# Altium footprint library DIM.PcbLib: 183 footprints (part 7 of 12)
Each footprint in its own frame and in the unit in brackets; x right, y up, seen from the top. Pads: shape width x height; smd on the part's side, far side on the other; paste and mask are expansions set on the pad; w line width, h text height; cw(c..) or ccw(c..) is an arc to the next point about the centre after c.
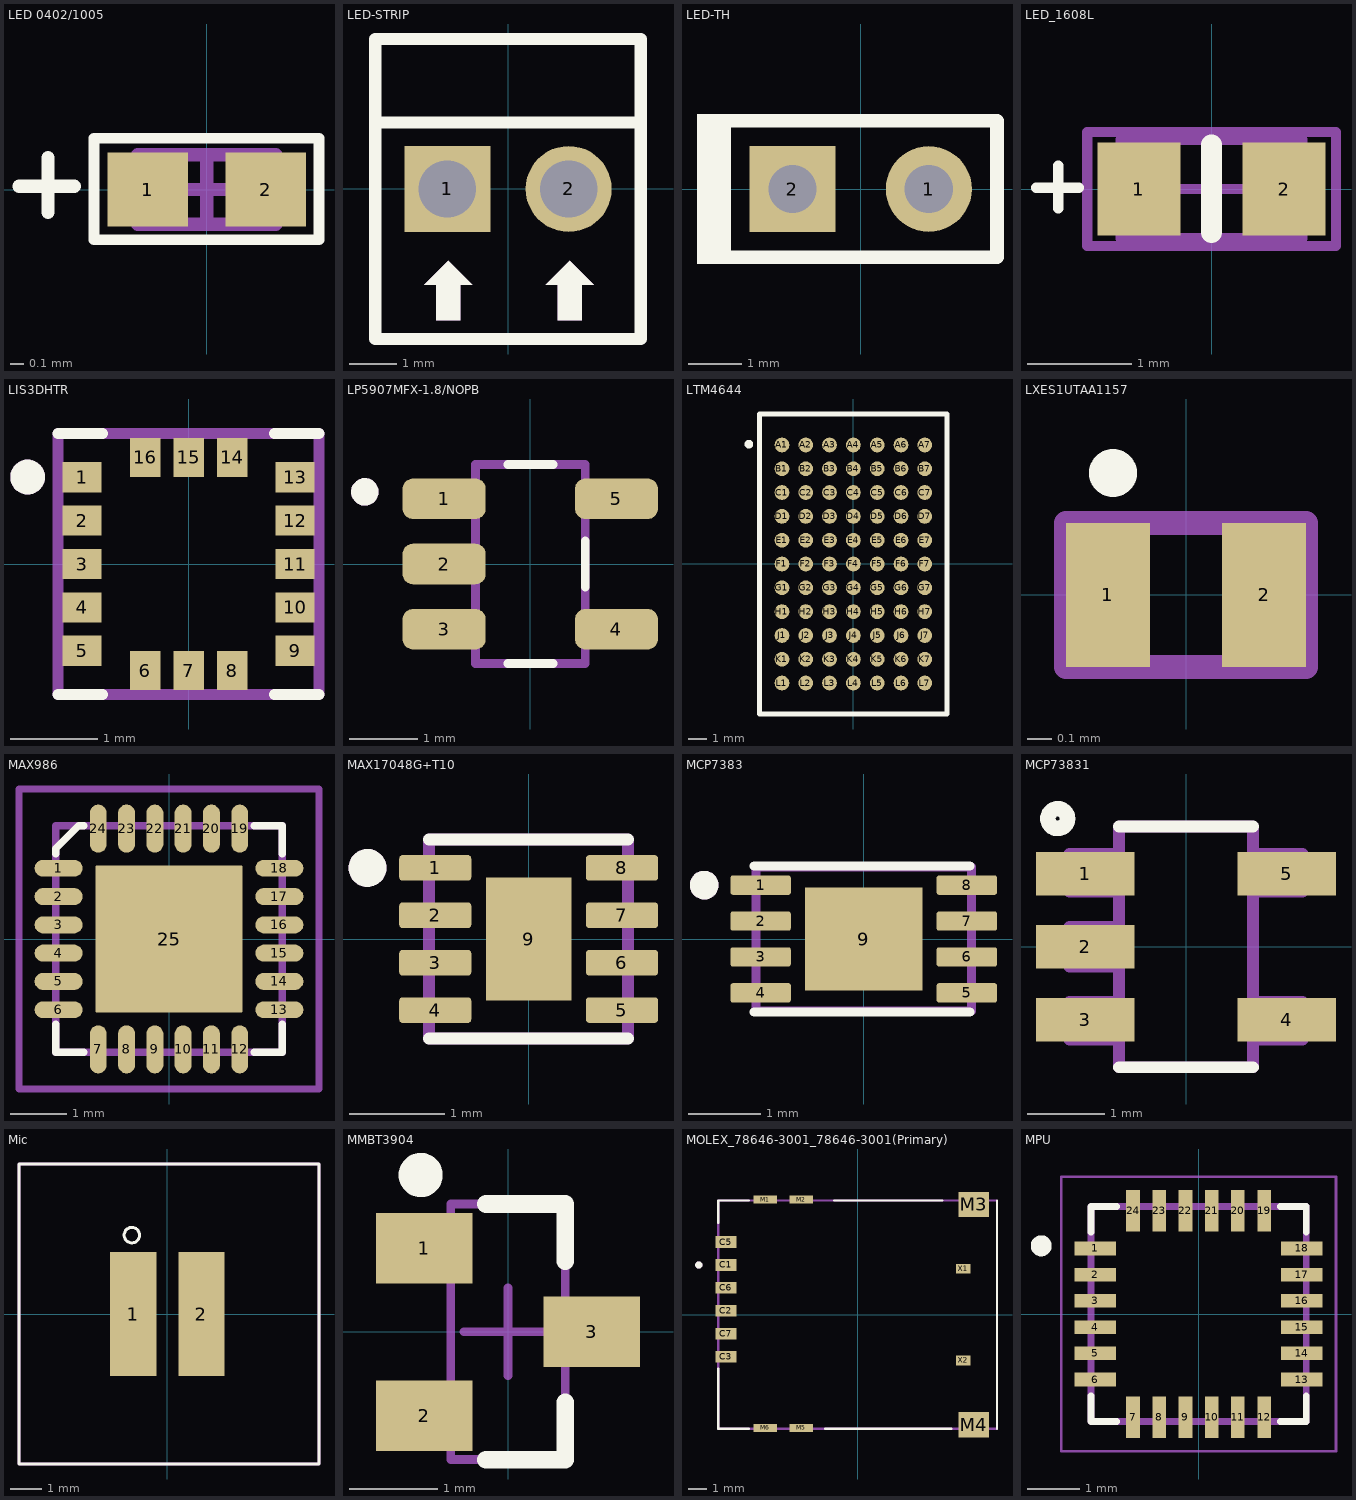
[diagram p6: the footprints below, top view; thin cyan lines are the x and y axes]

## LED 0402/1005 [mm] "Chip Capacitor, 2-Leads, Body 1.02x0.51mm, IPC Medium Density"
height 0.52
pads (2):
  rect 0.6x0.55 smd: 1(-0.44,0) 2(0.44,0)
Top Overlay:
  lines w0.08: -0.841,-0.374 0.836,-0.374 0.836,0.382 -0.841,0.382 -0.841,-0.141 -0.841,-0.374
  lines w0.1: -1.401,0.026 -0.99,0.026 ; -1.185,-0.171 -1.185,0.236
Mechanical 13:
  lines w0.1: -0.515,-0.26 -0.515,0.26 0.515,0.26 0.515,-0.26 -0.515,-0.26
Mechanical 15:
  lines w0.1: -0.26,0 0.26,0 ; 0,-0.26 0,0.26
3D body "0402 cap.STEP": height 0.52, standoff 0, extent -0.5,-0.262 0.5,0.262

## LED-STRIP [mm]
pads (2):
  rect 1.8x1.8 hole 1.2 paste+0 mask+0.051: 1(-1.27,0)
  round 1.8 hole 1.2 paste+0 mask+0.051: 2(1.27,0)
Top Overlay:
  region: -1.5,-2 -1,-2 -1,-2.75 -1.5,-2.75
  region: -1.25,-1.5 -1.75,-2 -0.75,-2
  region: 1.04,-2 1.54,-2 1.54,-2.75 1.04,-2.75
  region: 1.29,-1.5 0.79,-2 1.79,-2
  lines w0.254: -2.78,1.395 2.78,1.395 ; -2.78,-3.14 -2.78,3.139 2.78,3.139 2.78,-3.14 -2.78,-3.14
Mechanical 15:
  region: -1.499,-2 -0.999,-2 -0.999,-2.75 -1.499,-2.75
  region: -1.249,-1.5 -1.749,-2 -0.749,-2
  region: 1.291,-1.5 0.791,-2 1.791,-2
  region: 1.041,-2 1.541,-2 1.541,-2.75 1.041,-2.75

## LED-TH [mm] "859-LTL-4222N(MOUSER)"
pads (2):
  round 1.6 hole 0.9: 1(1.27,0)
  rect 1.6x1.6 hole 0.9: 2(-1.27,0)
Top Overlay:
  rectangle: -3.048,-1.397 -2.54,1.397
  lines w0.254: -2.54,-1.27 -2.54,1.27 2.54,1.27 2.54,-1.27 -2.54,-1.27
3D body: height 6, standoff -3, extent -1.716,-0.449 -0.82,0.449
3D body: height 6, standoff -3, extent 0.824,-0.449 1.72,0.449
3D body: height 6.45, standoff 5.55, extent 0.824,-0.449 1.72,2.551
3D body: height 6.45, standoff 5.55, extent -1.716,-0.449 -0.82,2.551
3D body: height 7.6, standoff 4.4, extent -1.587,2.556 1.6,3.556
3D body: height 7.5, standoff 4.5, extent -1.489,3.556 1.499,5.556
3D body: height 7.5, standoff 4.5, extent -1.491,4.062 1.494,7.05

## LED_1608L [mm] "Chip Capacitor, Body 1.6x0.8mm, IPC High Density"
height 0.85
pads (2):
  rect 0.8x0.9 smd: 1(-0.7,0) 2(0.7,0)
Top Overlay:
  lines w0.1: -1.693,0.013 -1.282,0.013 ; -1.477,-0.184 -1.477,0.223
  lines w0.2: -0.001,0.426 0,-0.42
Mechanical 13:
  lines w0.1: -0.875,-0.475 -0.875,0.475 0.875,0.475 0.875,-0.475 -0.875,-0.475
Mechanical 15:
  lines w0.1: -0.475,0 0.475,0 ; 0,-0.475 0,0.475 ; -1.2,-0.55 -1.2,0.55 1.2,0.55 1.2,-0.55 -1.2,-0.55
3D body: height 0.86, standoff 0, extent -0.889,-0.483 -0.508,0.483
3D body: height 0.85, standoff 0, extent -0.875,-0.475 0.875,0.475
3D body: height 0.86, standoff 0, extent 0.508,-0.483 0.889,0.483

## LIS3DHTR [mm]
pads (16):
  rect 0.45x0.35 smd paste-1 mask+0: 1(-1.225,1) 2(-1.225,0.5) 3(-1.225,0) 4(-1.225,-0.5) 5(-1.225,-1) 9(1.225,-1) 10(1.225,-0.5) 11(1.225,0) 12(1.225,0.5) 13(1.225,1)
  rect 0.35x0.45 smd paste-1 mask+0: 6(-0.5,-1.225) 7(0,-1.225) 8(0.5,-1.225) 14(0.5,1.225) 15(0,1.225) 16(-0.5,1.225)
Top Overlay:
  circle w0.2: c-1.85,1 r0.1
  lines w0.127: -1.5,-1.5 -0.99,-1.5 ; -1.5,1.5 -0.99,1.5 ; 0.99,-1.5 1.5,-1.5 ; 0.99,1.5 1.5,1.5
Top Paste:
  region: -1.045,0.86 -1.405,0.86 -1.405,1.14 -1.045,1.14
  region: -1.045,0.36 -1.405,0.36 -1.405,0.64 -1.045,0.64
  region: -1.045,-1.14 -1.405,-1.14 -1.405,-0.86 -1.045,-0.86
  region: -1.045,-0.64 -1.405,-0.64 -1.405,-0.36 -1.045,-0.36
  region: -0.36,-1.405 -0.64,-1.405 -0.64,-1.045 -0.36,-1.045
  region: 0.64,-1.405 0.36,-1.405 0.36,-1.045 0.64,-1.045
  region: 1.405,-1.14 1.045,-1.14 1.045,-0.86 1.405,-0.86
  region: 1.405,-0.64 1.045,-0.64 1.045,-0.36 1.405,-0.36
  region: 1.405,0.86 1.045,0.86 1.045,1.14 1.405,1.14
  region: 1.405,0.36 1.045,0.36 1.045,0.64 1.405,0.64
  region: 0.64,1.045 0.36,1.045 0.36,1.405 0.64,1.405
  region: -0.36,1.045 -0.64,1.045 -0.64,1.405 -0.36,1.405
  region: 0.14,1.045 -0.14,1.045 -0.14,1.405 0.14,1.405
  region: 1.405,-0.14 1.045,-0.14 1.045,0.14 1.405,0.14
  region: -1.045,-0.14 -1.405,-0.14 -1.405,0.14 -1.045,0.14
  region: 0.14,-1.405 -0.14,-1.405 -0.14,-1.045 0.14,-1.045
Top Solder:
  region: 1.5,0.775 0.95,0.775 0.95,1.225 1.5,1.225
  region: 1.5,0.275 0.95,0.275 0.95,0.725 1.5,0.725
  region: 1.5,-1.225 0.95,-1.225 0.95,-0.775 1.5,-0.775
  region: 1.5,-0.725 0.95,-0.725 0.95,-0.275 1.5,-0.275
  region: 0.725,-1.5 0.275,-1.5 0.275,-0.95 0.725,-0.95
  region: -0.275,-1.5 -0.725,-1.5 -0.725,-0.95 -0.275,-0.95
  region: -0.95,-1.225 -1.5,-1.225 -1.5,-0.775 -0.95,-0.775
  region: -0.95,-0.725 -1.5,-0.725 -1.5,-0.275 -0.95,-0.275
  region: -0.95,0.775 -1.5,0.775 -1.5,1.225 -0.95,1.225
  region: -0.95,0.275 -1.5,0.275 -1.5,0.725 -0.95,0.725
  region: 0.725,0.95 0.275,0.95 0.275,1.5 0.725,1.5
  region: -0.275,0.95 -0.725,0.95 -0.725,1.5 -0.275,1.5
  region: 0.225,-1.5 -0.225,-1.5 -0.225,-0.95 0.225,-0.95
  region: 0.225,0.95 -0.225,0.95 -0.225,1.5 0.225,1.5
  region: 1.5,-0.225 0.95,-0.225 0.95,0.225 1.5,0.225
  region: -0.95,-0.225 -1.5,-0.225 -1.5,0.225 -0.95,0.225
Mechanical 13:
  circle w0.2: c-1.85,1 r0.1
  lines w0.127: -1.5,-1.5 1.5,-1.5 1.5,1.5 -1.5,1.5 -1.5,-1.5
3D body "step_temp.STEP": height 1, standoff 0, extent -1.5,-1.5 1.5,1.5

## LP5907MFX-1.8/NOPB [mm]
pads (5):
  rrect50% 1.21x0.59 smd: 1(-1.255,0.95) 2(-1.255,0) 3(-1.255,-0.95) 4(1.255,-0.95) 5(1.255,0.95)
Top Overlay:
  circle w0.2: c-2.41,1.05 r0.1
  lines w0.127: -0.33,-1.45 0.33,-1.45 ; -0.33,1.45 0.33,1.45 ; 0.8,-0.335 0.8,0.335
Mechanical 13:
  circle w0.2: c-2.41,1.05 r0.1
  lines w0.127: -0.8,-1.45 -0.8,1.45 0.8,1.45 0.8,-1.45 -0.8,-1.45
3D body "LP5907MFX-1.8_NOPB.step": height 1.45, standoff 0, extent -1.4,-1.45 1.4,1.45

## LTM4644 [mil] "FPGA Power"
pads (77):
  round 31 smd: A1(-150,250) A2(-100,250) A3(-50,250) A4(0,250) A5(50,250) A6(100,250) A7(150,250) B1(-150,200) B2(-100,200) B3(-50,200) B4(0,200) B5(50,200) B6(100,200) B7(150,200) C1(-150,150) C2(-100,150) C3(-50,150) C4(0,150) C5(50,150) C6(100,150) C7(150,150) D1(-150,100) D2(-100,100) D3(-50,100) D4(0,100) D5(50,100) D6(100,100) D7(150,100) E1(-150,50) E2(-100,50) E3(-50,50) E4(0,50) E5(50,50) E6(100,50) E7(150,50) F1(-150,0) F2(-100,0) F3(-50,0) F4(0,0) F5(50,0) F6(100,0) F7(150,0) G1(-150,-50) G2(-100,-50) G3(-50,-50) G4(0,-50) G5(50,-50) G6(100,-50) G7(150,-50) H1(-150,-100) H2(-100,-100) H3(-50,-100) H4(0,-100) H5(50,-100) H6(100,-100) H7(150,-100) J1(-150,-150) J2(-100,-150) J3(-50,-150) J4(0,-150) J5(50,-150) J6(100,-150) J7(150,-150) K1(-150,-200) K2(-100,-200) K3(-50,-200) K4(0,-200) K5(50,-200) K6(100,-200) K7(150,-200) L1(-150,-250) L2(-100,-250) L3(-50,-250) L4(0,-250) L5(50,-250) L6(100,-250) L7(150,-250)
Top Overlay:
  circle w10: c-219.49,251.65 r4.16
  lines w10: -196.85,-314.96 -196.85,314.96 196.85,314.96 196.85,-314.96 -196.85,-314.96
3D body: height 197.24, standoff 0, extent -196.85,-314.96 196.85,311.02

## LXES1UTAA1157 [mm]
pads (2):
  rect 0.35x0.6 smd: 1(-0.325,0) 2(0.325,0)
Top Overlay:
  lines w0.1: -0.354,0.508 cw(c-0.304,0.508) -0.254,0.508 cw(c-0.304,0.508) -0.354,0.508
Mechanical 13:
  lines w0.1: -0.5,-0.3 -0.5,0.3 0.5,0.3 0.5,-0.3 -0.5,-0.3
3D body "LXES1UTAA1-157.stp": height 0.5, standoff 0, extent -0.5,-0.3 0.5,0.3

## MAX986 [mm]
pads (25):
  oval 0.85x0.3 smd: 1(-1.95,1.25) 2(-1.95,0.75) 3(-1.95,0.25) 4(-1.95,-0.25) 5(-1.95,-0.75) 6(-1.95,-1.25) 13(1.95,-1.25) 14(1.95,-0.75) 15(1.95,-0.25) 16(1.95,0.25) 17(1.95,0.75) 18(1.95,1.25)
  oval 0.3x0.85 smd: 7(-1.25,-1.95) 8(-0.75,-1.95) 9(-0.25,-1.95) 10(0.25,-1.95) 11(0.75,-1.95) 12(1.25,-1.95) 19(1.25,1.95) 20(0.75,1.95) 21(0.25,1.95) 22(-0.25,1.95) 23(-0.75,1.95) 24(-1.25,1.95)
  rrect2% 2.6x2.6 smd: 25(0,0)
Top Overlay:
  lines w0.127: -2,-1.5 -2,-2 -1.5,-2 ; -2,1.5 -2,1.6 -1.6,2 -1.5,2 ; 1.5,-2 2,-2 2,-1.5 ; 1.5,2 2,2 2,1.5
Mechanical 13:
  lines w0.127: -2,-2 2,-2 2,2 -2,2 -2,-2
Mechanical 15:
  lines w0.127: -2.65,-2.65 2.65,-2.65 2.65,2.65 -2.65,2.65 -2.65,-2.65

## MAX17048G+T10 [mm]
pads (9):
  rrect25% 0.76x0.27 smd: 1(-0.985,0.75) 2(-0.985,0.25) 3(-0.985,-0.25) 4(-0.985,-0.75) 5(0.985,-0.75) 6(0.985,-0.25) 7(0.985,0.25) 8(0.985,0.75)
  rect 0.9x1.3 smd paste-2: 9(0,0)
Top Overlay:
  circle w0.2: c-1.7,0.75 r0.1
  lines w0.127: -1.05,-1.05 1.05,-1.05 ; -1.05,1.05 1.05,1.05
Top Paste:
  region: 0.28,-0.41 -0.28,-0.41 -0.28,0.41 0.28,0.41
Mechanical 13:
  circle w0.2: c-1.7,0.75 r0.1
  lines w0.127: -1.05,-1.05 1.05,-1.05 1.05,1.05 -1.05,1.05 -1.05,-1.05
3D body "step_temp.STEP": height 0.8, standoff 0, extent -1,-1 1,1

## MCP7383 [mm]
pads (9):
  rrect25% 0.84x0.27 smd: 1(-1.435,0.75) 2(-1.435,0.25) 3(-1.435,-0.25) 4(-1.435,-0.75) 5(1.435,-0.75) 6(1.435,-0.25) 7(1.435,0.25) 8(1.435,0.75)
  rect 1.63x1.43 smd paste-2: 9(0,0)
Top Overlay:
  circle w0.2: c-2.221,0.75 r0.1
  lines w0.127: -1.524,-1.016 1.476,-1.016 ; -1.524,1.016 1.476,1.016
Top Paste:
  region: 0.51,-0.45 -0.51,-0.45 -0.51,0.45 0.51,0.45
Mechanical 13:
  circle w0.2: c-2.221,0.75 r0.1
  lines w0.127: -1.5,-1 -1.5,1 1.5,1 1.5,-1 -1.5,-1
3D body "MCP73831T-2DCI_MC.STEP": height 0.9, standoff -0.1, extent -1.5,-1 1.5,1

## MCP73831 [mil]
pads (5):
  rect 50x22 smd: 1(-51,37) 2(-51,0) 3(-51,-37) 4(51,-37) 5(51,37)
Top Overlay:
  circle w7.87: c-65,65 r5
  lines w6: -34,-61 34,-61 ; -34,61 34,61
Mechanical 13:
  lines w6: -34,-47 -34,-61 34,-61 34,-47 ; -34,-47 -34,-28 ; -34,-47 -59,-47 -59,-28 -34,-28 ; -34,-28 -34,-10 ; -34,-10 -34,10 ; -34,-10 -59,-10 -59,10 -34,10 ; -34,10 -34,28 ; -34,28 -34,47 ; -34,28 -59,28 -59,47 -34,47 ; -34,47 -34,61 -12,61 12,61 34,61 34,47 ; 34,-47 34,-28 ; 34,-47 59,-47 59,-28 34,-28 ; 34,-28 34,28 ; 34,28 34,47 ; 34,28 59,28 59,47 34,47
3D body "step_temp.STEP": height 57.09, standoff 0, extent -53.15,-57.09 53.15,57.09

## Mic [mm]
pads (2):
  rect 1.5x4 smd: 1(-1.1,0) 2(1.1,0)
Top Overlay:
  circle w0.1: c-1.15,2.55 r0.25
  lines w0.1: -4.8,-4.85 -4.8,4.85 4.9,4.85 4.9,-4.85 -4.8,-4.85
Mechanical 13:
  lines w0.1: -4.8,-4.85 4.9,-4.85 4.9,4.85 -4.8,4.85 -4.8,-4.85
3D body "CUI_DEVICES_CMI-5247TF-K.step": height 5.6, standoff 0, extent -4.8,-4.85 4.9,4.85

## MMBT3904 [mm]
height 1
pads (3):
  rect 1.1x0.8 smd: 1(-0.95,0.95) 2(-0.95,-0.95) 3(0.95,0)
Top Overlay:
  circle w0.25: c-0.991,1.778 r0.125
  lines w0.2: -0.25,-1.45 0.65,-1.45 0.65,-0.8 ; -0.25,1.45 0.65,1.45 0.65,0.8
Mechanical 13:
  lines w0.1: -0.65,-1.45 0.65,-1.45 0.65,1.45 -0.65,1.45 -0.65,-1.45
Mechanical 15:
  lines w0.1: -0.5,0 0.5,0 ; 0,-0.5 0,0.5
3D body: height 1, standoff 0.05, extent -0.65,-1.45 0.65,1.45

## MOLEX_78646-3001_78646-3001(Primary) [mm]
pads (14):
  rect 1.15x0.65 smd: C1(-7.295,2.755) C2(-7.295,0.215) C3(-7.295,-2.325) C5(-7.295,4.025) C6(-7.295,1.485) C7(-7.295,-1.055)
  rect 1.3x0.45 smd: M1(-5.125,6.38) M2(-3.125,6.38) M5(-3.125,-6.27) M6(-5.125,-6.27)
  rect 1.7x1.4 smd: M3(6.435,6.105) M4(6.435,-6.105)
  rect 0.8x0.54 smd: X1(5.855,2.545) X2(5.855,-2.535)
Top Overlay:
  circle w0.2: c-8.795,2.755 r0.1
  lines w0.127: -7.725,-3 -7.725,-6.325 -6.025,-6.325 ; -7.725,5.08 -7.725,6.325 -6.025,6.325 ; -1.795,-6.325 5.205,-6.325 ; -1.295,6.325 4.705,6.325 ; 7.725,-6.325 7.725,6.325
Mechanical 4:
  circle w0.2: c-8.795,2.755 r0.1
  circle w0.2: c-8.795,2.755 r0.1
  lines w0.127: -7.725,-6.325 -7.725,6.325 ; -7.725,-6.325 7.725,-6.325 ; -7.725,-6.325 -7.725,6.325 ; -7.725,-6.325 7.725,-6.325 ; -7.725,6.325 7.725,6.325 ; -7.725,6.325 7.725,6.325 ; 7.725,-6.325 7.725,6.325 ; 7.725,-6.325 7.725,6.325
3D body "786463001.stp": height 1.81, standoff 0.36, extent -7.598,-6.477 7.852,6.573

## MPU [mm]
pads (24):
  rect 0.79x0.26 smd: 1(-1.97,1.25) 2(-1.97,0.75) 3(-1.97,0.25) 4(-1.97,-0.25) 5(-1.97,-0.75) 6(-1.97,-1.25) 13(1.97,-1.25) 14(1.97,-0.75) 15(1.97,-0.25) 16(1.97,0.25) 17(1.97,0.75) 18(1.97,1.25)
  rect 0.26x0.79 smd: 7(-1.25,-1.97) 8(-0.75,-1.97) 9(-0.25,-1.97) 10(0.25,-1.97) 11(0.75,-1.97) 12(1.25,-1.97) 19(1.25,1.97) 20(0.75,1.97) 21(0.25,1.97) 22(-0.25,1.97) 23(-0.75,1.97) 24(-1.25,1.97)
Top Overlay:
  circle w0.2: c-3,1.3 r0.1
  lines w0.127: -2.05,-1.56 -2.05,-2.05 -1.56,-2.05 ; -2.05,1.56 -2.05,2.05 -1.56,2.05 ; 1.56,-2.05 2.05,-2.05 2.05,-1.56 ; 1.56,2.05 2.05,2.05 2.05,1.56
Mechanical 13:
  lines w0.127: -2.05,-2.05 -2.05,2.05 2.05,2.05 2.05,-2.05 -2.05,-2.05
Mechanical 15:
  lines w0.05: -2.62,-2.62 -2.62,2.62 2.62,2.62 2.62,-2.62 -2.62,-2.62